# EAGLE library part SI4464-B1B-FMR (library SI4464-B1B-FMR)
RF Transceiver +20 dBm sub-GHz transmitter Source: Datasheet <https://www.silabs.com/documents/public/data-sheets/Si4464-63-61-60.pdf>
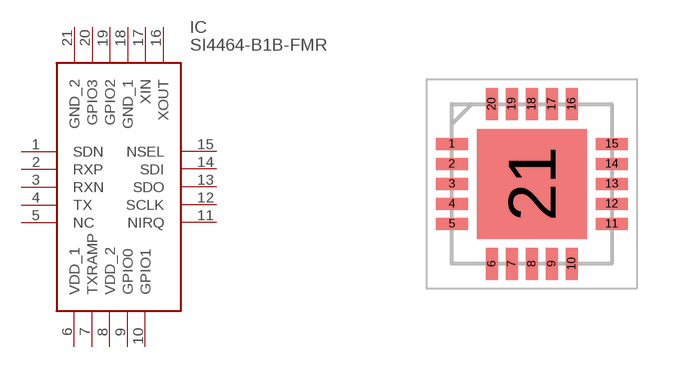
[diagram p0: symbol with the pads of QFN50P400X400X90-21N; footprint QFN50P400X400X90-21N]

Designator prefix IC

## SI4464-B1B-FMR (Description: RF Transceiver +20 dBm sub-GHz transmitter; Height: 0.9mm; Manufacturer_Name: Silicon Labs; Manufacturer_Part_Number: SI4464-B1B-FMR; Mouser_Part_Number: 634-SI4464-B1X-FMR; Mouser_Price-Stock: https://www.mouser.co.uk/ProductDetail/Silicon-Labs/SI4464-B1B-FMR?qs=v11sNlF%252BHAdMGha0TrMSMw%3D%3D)  [QFN50P400X400X90-21N]
1  SDN
2  RXP
3  RXN
4  TX
5  NC  nc
6  VDD_1
7  TXRAMP
8  VDD_2
9  GPIO0
10  GPIO1
11  NIRQ
12  SCLK
13  SDO
14  SDI
15  NSEL
16  XOUT
17  XIN
18  GND_1
19  GPIO2
20  GPIO3
21  GND_2

## Footprint QFN50P400X400X90-21N (pad centres in mm)
SI4464-B1B-FMR
smd 0.8 x 0.3: 1 -2,1; 2 -2,0.5; 3 -2,0; 4 -2,-0.5; 5 -2,-1; 11 2,-1; 12 2,-0.5; 13 2,0; 14 2,0.5; 15 2,1
smd 0.3 x 0.8: 6 -1,-2; 7 -0.5,-2; 8 0,-2; 9 0.5,-2; 10 1,-2; 16 1,2; 17 0.5,2; 18 0,2; 19 -0.5,2; 20 -1,2
smd 2.75 x 2.75: 21 0,0